# Altium footprint library ubloxLib.PcbLib: 41 footprints (part 2 of 3)
Each footprint in its own frame and in the unit in brackets; x right, y up, seen from the top. Pads: shape width x height; smd on the part's side, far side on the other; paste and mask are expansions set on the pad; w line width, h text height; cw(c..) or ccw(c..) is an arc to the next point about the centre after c.
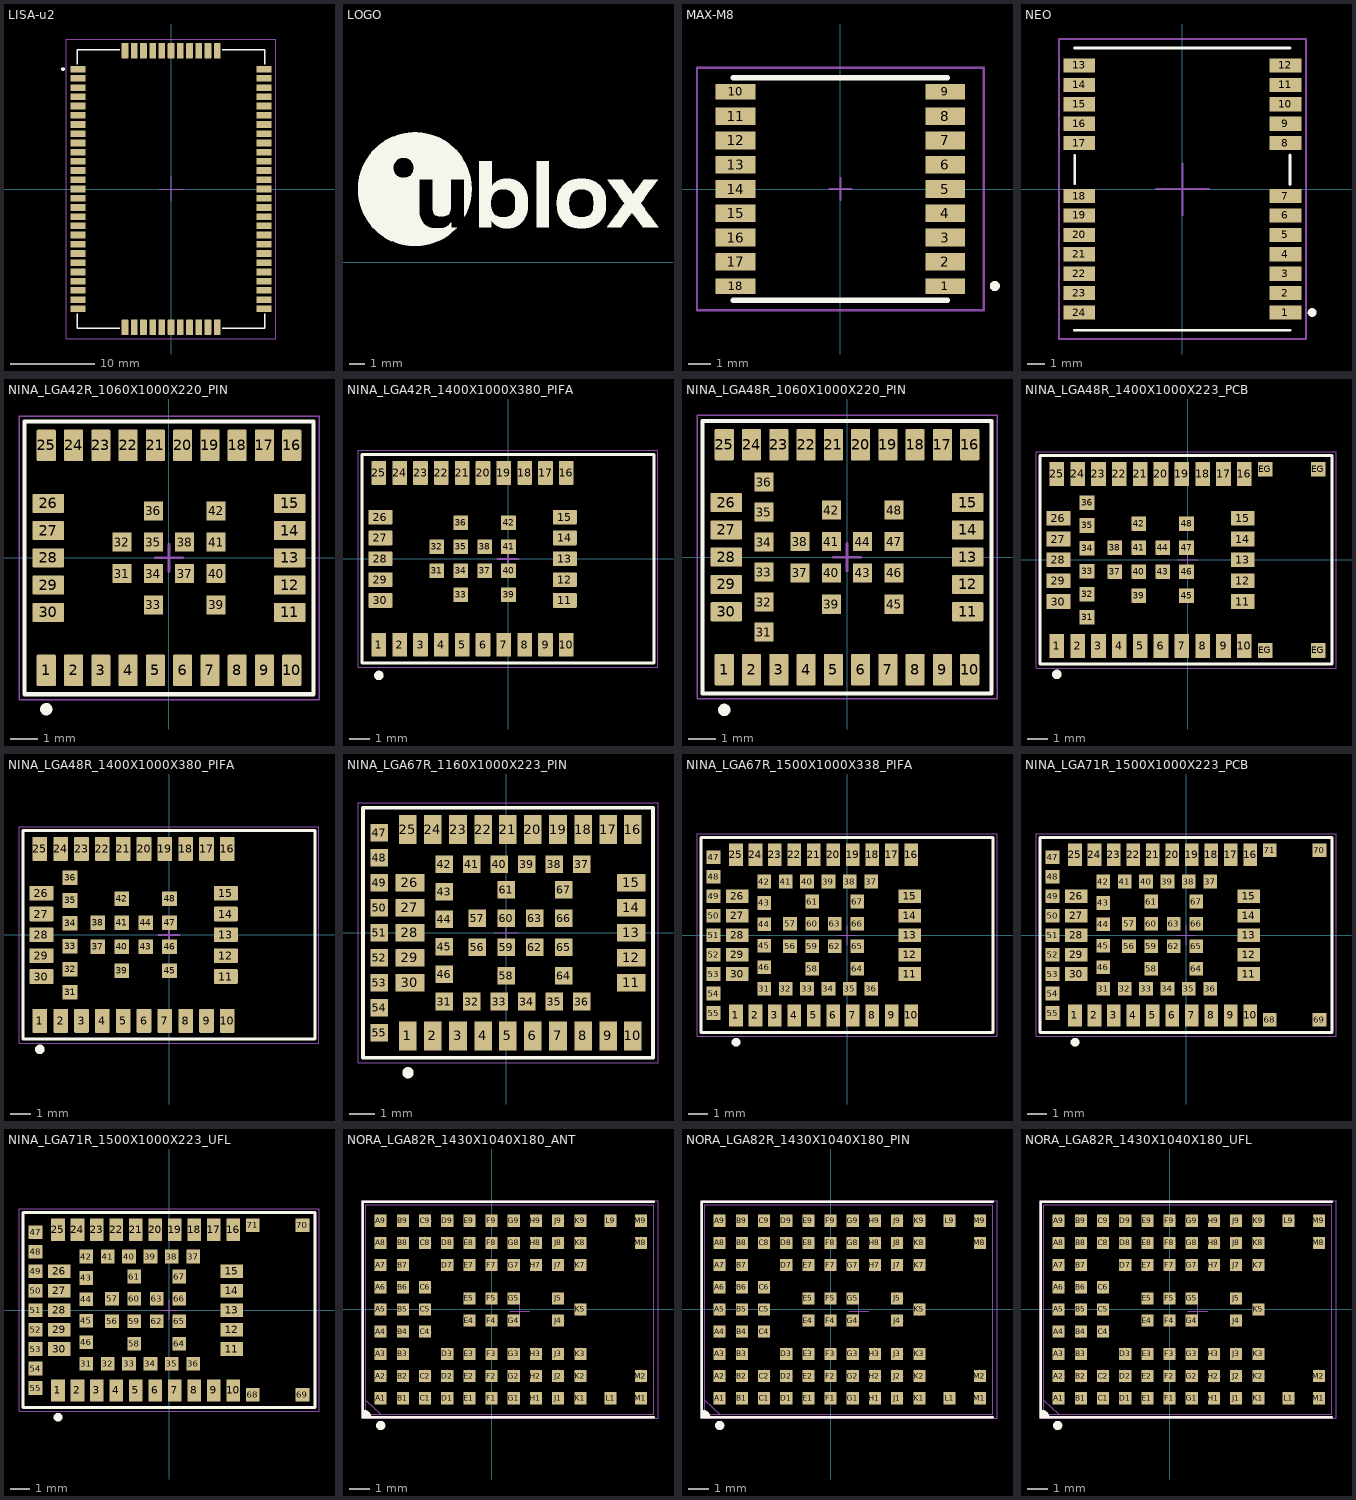
[diagram p1: the footprints below, top view; thin cyan lines are the x and y axes]

## LISA-u2 [mm] "3.75G HSPA+ Cellular Module"
height 2.87
pads (76):
  rrect7% 1.8x0.8 smd paste-10: 1(-11.1,14.3) 2(-11.1,13.2) 3(-11.1,12.1) 4(-11.1,11) 5(-11.1,9.9) 6(-11.1,8.8) 7(-11.1,7.7) 8(-11.1,6.6) 9(-11.1,5.5) 10(-11.1,4.4) 11(-11.1,3.3) 12(-11.1,2.2) 13(-11.1,1.1) 14(-11.1,0) 15(-11.1,-1.1) 16(-11.1,-2.2) 17(-11.1,-3.3) 18(-11.1,-4.4) 19(-11.1,-5.5) 20(-11.1,-6.6) 21(-11.1,-7.7) 22(-11.1,-8.8) 23(-11.1,-9.9) 24(-11.1,-11) 25(-11.1,-12.1) 26(-11.1,-13.2) 27(-11.1,-14.3) 39(11.1,-14.3) 40(11.1,-13.2) 41(11.1,-12.1) 42(11.1,-11) 43(11.1,-9.9) 44(11.1,-8.8) 45(11.1,-7.7) 46(11.1,-6.6) 47(11.1,-5.5) 48(11.1,-4.4) 49(11.1,-3.3) 50(11.1,-2.2) 51(11.1,-1.1) 52(11.1,0) 53(11.1,1.1) 54(11.1,2.2) 55(11.1,3.3) 56(11.1,4.4) 57(11.1,5.5) 58(11.1,6.6) 59(11.1,7.7) 60(11.1,8.8) 61(11.1,9.9) 62(11.1,11) 63(11.1,12.1) 64(11.1,13.2) 65(11.1,14.3)
  rrect7% 0.8x1.8 smd paste-10: 28(-5.5,-16.5) 29(-4.4,-16.5) 30(-3.3,-16.5) 31(-2.2,-16.5) 32(-1.1,-16.5) 33(0,-16.5) 34(1.1,-16.5) 35(2.2,-16.5) 36(3.3,-16.5) 37(4.4,-16.5) 38(5.5,-16.5) 66(5.5,16.5) 67(4.4,16.5) 68(3.3,16.5) 69(2.2,16.5) 70(1.1,16.5) 71(0,16.5) 72(-1.1,16.5) 73(-2.2,16.5) 74(-3.3,16.5) 75(-4.4,16.5) 76(-5.5,16.5)
Top Overlay:
  circle w0.254: c-12.9,14.3 r0.1
  lines w0.15: -11.2,-14.9 -11.2,-16.6 -6.1,-16.6 ; -11.2,14.9 -11.2,16.6 -6.1,16.6 ; 6.1,-16.6 11.2,-16.6 11.2,-14.9 ; 6.1,16.6 11.2,16.6 11.2,14.9
Top Paste:
  drawing of 152 lines, arcs and shapes, not listed
Mechanical 15:
  lines w0.05: -12.5,-17.9 -12.5,17.9 12.5,17.9 12.5,-17.9 -12.5,-17.9
  lines w0.1: -1.499,0 0,0 1.501,0 ; 0,-1.419 0,0.1 0,1.545
  text ".Designator" at 0.1,0.433 h1
3D body: height 2.87, standoff 0, extent -11.2,-16.6 11.2,16.6

## LOGO [mm] "u-blox logo"
Top Overlay:
  drawing of 5 lines, arcs and shapes, not listed

## MAX-M8 [mm] "u-blox M8 concurrent GNSS modules"
height 2.7
pads (18):
  rect 1.8x0.7 smd paste-10: 1(4.75,-4.4) 9(4.75,4.4) 10(-4.75,4.4) 18(-4.75,-4.4)
  rect 1.8x0.8 smd paste-10: 2(4.75,-3.3) 3(4.75,-2.2) 4(4.75,-1.1) 5(4.75,0) 6(4.75,1.1) 7(4.75,2.2) 8(4.75,3.3) 11(-4.75,3.3) 12(-4.75,2.2) 13(-4.75,1.1) 14(-4.75,0) 15(-4.75,-1.1) 16(-4.75,-2.2) 17(-4.75,-3.3)
Top Overlay:
  circle w0.254: c7,-4.4 r0.1
  lines w0.254: -4.85,-5.05 4.85,-5.05 ; -4.85,5.05 4.85,5.05
Top Paste:
  region: 6.25,2.9 6.25,3.7 4.85,3.7 4.85,3.6 3.95,3.6 3.95,3 4.85,3 4.85,2.9
  region: 6.25,1.8 6.25,2.6 4.85,2.6 4.85,2.5 3.95,2.5 3.95,1.9 4.85,1.9 4.85,1.8
  region: 6.25,0.7 6.25,1.5 4.85,1.5 4.85,1.4 3.95,1.4 3.95,0.8 4.85,0.8 4.85,0.7
  region: 6.25,-0.4 6.25,0.4 4.85,0.4 4.85,0.3 3.95,0.3 3.95,-0.3 4.85,-0.3 4.85,-0.4
  region: 6.25,-1.5 6.25,-0.7 4.85,-0.7 4.85,-0.8 3.95,-0.8 3.95,-1.4 4.85,-1.4 4.85,-1.5
  region: 6.25,-2.6 6.25,-1.8 4.85,-1.8 4.85,-1.9 3.95,-1.9 3.95,-2.5 4.85,-2.5 4.85,-2.6
  region: 6.25,-3.7 6.25,-2.9 4.85,-2.9 4.85,-3 3.95,-3 3.95,-3.6 4.85,-3.6 4.85,-3.7
  region: -6.25,-2.9 -6.25,-3.7 -4.85,-3.7 -4.85,-3.6 -3.95,-3.6 -3.95,-3 -4.85,-3 -4.85,-2.9
  region: -6.25,-1.8 -6.25,-2.6 -4.85,-2.6 -4.85,-2.5 -3.95,-2.5 -3.95,-1.9 -4.85,-1.9 -4.85,-1.8
  region: -6.25,-0.7 -6.25,-1.5 -4.85,-1.5 -4.85,-1.4 -3.95,-1.4 -3.95,-0.8 -4.85,-0.8 -4.85,-0.7
  region: -6.25,0.4 -6.25,-0.4 -4.85,-0.4 -4.85,-0.3 -3.95,-0.3 -3.95,0.3 -4.85,0.3 -4.85,0.4
  region: -6.25,1.5 -6.25,0.7 -4.85,0.7 -4.85,0.8 -3.95,0.8 -3.95,1.4 -4.85,1.4 -4.85,1.5
  region: -6.25,2.6 -6.25,1.8 -4.85,1.8 -4.85,1.9 -3.95,1.9 -3.95,2.5 -4.85,2.5 -4.85,2.6
  region: -6.25,3.7 -6.25,2.9 -4.85,2.9 -4.85,3 -3.95,3 -3.95,3.6 -4.85,3.6 -4.85,3.7
  region: -6.25,-4.05 -6.25,-4.75 -4.85,-4.75 -4.85,-4.65 -3.95,-4.65 -3.95,-4.15 -4.85,-4.15 -4.85,-4.05
  region: 6.25,-4.75 6.25,-4.05 4.85,-4.05 4.85,-4.15 3.95,-4.15 3.95,-4.65 4.85,-4.65 4.85,-4.75
  region: 6.25,4.05 6.25,4.75 4.85,4.75 4.85,4.65 3.95,4.65 3.95,4.15 4.85,4.15 4.85,4.05
  region: -6.25,4.75 -6.25,4.05 -4.85,4.05 -4.85,4.15 -3.95,4.15 -3.95,4.65 -4.85,4.65 -4.85,4.75
Mechanical 15:
  lines w0.1: -0.5,0 0,0 ; 0,-0.5 0,0 ; 0,0.5 0,0 ; 0.5,0 0,0 ; -6.5,-5.5 6.5,-5.5 6.5,5.5 -6.5,5.5 -6.5,-5.5
  text ".Designator" at 0.1,0.433 h1
3D body: height 2.7, standoff 0, extent -4.851,-5.05 4.849,5.05

## NEO [mm] "u-blox NEO GNSS module"
pads (24):
  rect 1.8x0.8 smd paste-0.1: 1(5.842,-7) 2(5.842,-5.9) 3(5.842,-4.8) 4(5.842,-3.7) 5(5.842,-2.6) 6(5.842,-1.5) 7(5.842,-0.4) 8(5.842,2.6) 9(5.842,3.7) 10(5.842,4.8) 11(5.842,5.9) 12(5.842,7) 13(-5.842,7) 14(-5.842,5.9) 15(-5.842,4.8) 16(-5.842,3.7) 17(-5.842,2.6) 18(-5.842,-0.4) 19(-5.842,-1.5) 20(-5.842,-2.6) 21(-5.842,-3.7) 22(-5.842,-4.8) 23(-5.842,-5.9) 24(-5.842,-7)
Top Overlay:
  circle w0.38: c7.35,-7 r0.058
  lines w0.16: -6.109,-8 6.096,-8 ; -6.109,7.996 6.09,7.996 ; -6.102,0.299 -6.102,1.893 ; 6.096,0.255 6.096,1.919
Top Paste:
  rectangle: -6.833,-4.1 -5.633,-3.3
  rectangle: -6.833,-7.4 -5.633,-6.6
  rectangle: -6.833,-6.3 -5.633,-5.5
  rectangle: -6.833,-5.2 -5.633,-4.4
  rectangle: -6.833,-3 -5.633,-2.2
  rectangle: -6.833,-1.9 -5.633,-1.1
  rectangle: -6.833,-0.8 -5.633,0
  rectangle: -6.833,2.2 -5.633,3
  rectangle: -6.833,3.3 -5.633,4.1
  rectangle: -6.833,4.4 -5.633,5.2
  rectangle: -6.833,5.5 -5.633,6.3
  rectangle: -6.833,6.6 -5.633,7.4
  rectangle: 5.642,6.6 6.842,7.4
  rectangle: 5.642,5.5 6.842,6.3
  rectangle: 5.642,4.4 6.842,5.2
  rectangle: 5.642,3.3 6.842,4.1
  rectangle: 5.642,2.2 6.842,3
  rectangle: 5.642,-0.8 6.842,0
  rectangle: 5.642,-1.9 6.842,-1.1
  rectangle: 5.642,-3 6.842,-2.2
  rectangle: 5.642,-4.1 6.842,-3.3
  rectangle: 5.642,-5.2 6.842,-4.4
  rectangle: 5.642,-6.3 6.842,-5.5
  rectangle: 5.642,-7.4 6.842,-6.6
Mechanical 15:
  lines w0.1: -1.499,0 0,0 ; 0,-1.519 0,0 ; 0,1.445 0,0 ; 1.501,0 0,0 ; -7,-8.5 -7,8.5 7,8.5 7,-8.5 -7,-8.5
  text ".Designator" at 0.1,0.433 h1
3D body "NEO (STEP-AP214)_B.STEP": height 2.28, standoff -0.05, extent -6.104,-8 6.096,8

## NINA_LGA42R_1060X1000X220_PIN [mm] "Stand-alone Bluetooth low energy module"
height 2.2
pads (42):
  rrect10% 0.7x1.15 smd paste+0 mask+0.05: 1(-4.5,-4.125) 2(-3.5,-4.125) 3(-2.5,-4.125) 4(-1.5,-4.125) 5(-0.5,-4.125) 6(0.5,-4.125) 7(1.5,-4.125) 8(2.5,-4.125) 9(3.5,-4.125) 10(4.5,-4.125) 16(4.5,4.125) 17(3.5,4.125) 18(2.5,4.125) 19(1.5,4.125) 20(0.5,4.125) 21(-0.5,4.125) 22(-1.5,4.125) 23(-2.5,4.125) 24(-3.5,4.125) 25(-4.5,4.125)
  rrect10% 1.15x0.7 smd paste+0 mask+0.05: 11(4.425,-2) 12(4.425,-1) 13(4.425,0) 14(4.425,1) 15(4.425,2) 26(-4.425,2) 27(-4.425,1) 28(-4.425,0) 29(-4.425,-1) 30(-4.425,-2)
  rect 0.7x0.7 smd paste+0 mask+0.05: 31(-1.725,-0.575) 32(-1.725,0.575) 33(-0.575,-1.725) 34(-0.575,-0.575) 35(-0.575,0.575) 36(-0.575,1.725) 37(0.575,-0.575) 38(0.575,0.575) 39(1.725,-1.725) 40(1.725,-0.575) 41(1.725,0.575) 42(1.725,1.725)
Top Overlay:
  circle w0.254: c-4.5,-5.55 r0.1
  lines w0.15: -5.3,-5 5.3,-5 5.3,5 -5.3,5 -5.3,-5
Mechanical 13:
  lines w0.1: -5.3,-5 5.302,-5 5.302,5 -5.3,5 -5.3,-5
Mechanical 15:
  lines w0.05: -5.5,-5.2 -5.5,5.2 5.5,5.2 5.5,-5.2 -5.5,-5.2
  lines w0.1: -0.5,0 0,0 0.5,0 ; 0,-0.5 0,0.5
  text ".Designator" at 0.1,0.433 h1
3D body "NINA-B111.STEP": height 2.26, standoff 0.03, extent -5.3,-5 5.3,5

## NINA_LGA42R_1400X1000X380_PIFA [mm] "Stand-alone Bluetooth low energy module"
height 3.8
pads (42):
  rrect10% 0.7x1.15 smd paste+0 mask+0.05: 1(-6.2,-4.125) 2(-5.2,-4.125) 3(-4.2,-4.125) 4(-3.2,-4.125) 5(-2.2,-4.125) 6(-1.2,-4.125) 7(-0.2,-4.125) 8(0.8,-4.125) 9(1.8,-4.125) 10(2.8,-4.125) 16(2.8,4.125) 17(1.8,4.125) 18(0.8,4.125) 19(-0.2,4.125) 20(-1.2,4.125) 21(-2.2,4.125) 22(-3.2,4.125) 23(-4.2,4.125) 24(-5.2,4.125) 25(-6.2,4.125)
  rrect10% 1.15x0.7 smd paste+0 mask+0.05: 11(2.725,-2) 12(2.725,-1) 13(2.725,0) 14(2.725,1) 15(2.725,2) 26(-6.125,2) 27(-6.125,1) 28(-6.125,0) 29(-6.125,-1) 30(-6.125,-2)
  rect 0.7x0.7 smd paste+0 mask+0.05: 31(-3.425,-0.575) 32(-3.425,0.575) 33(-2.275,-1.725) 34(-2.275,-0.575) 35(-2.275,0.575) 36(-2.275,1.725) 37(-1.125,-0.575) 38(-1.125,0.575) 39(0.025,-1.725) 40(0.025,-0.575) 41(0.025,0.575) 42(0.025,1.725)
Top Overlay:
  circle w0.254: c-6.2,-5.6 r0.1
  lines w0.15: -7,-5 -7,5 7,5 7,-5 -7,-5
Mechanical 13:
  lines w0.1: -7,-5 -7,5 7,5 7,-5 -7,-5
Mechanical 15:
  lines w0.05: -7.2,-5.2 -7.2,5.2 7.2,5.2 7.2,-5.2 -7.2,-5.2
  lines w0.1: -0.5,0 0,0 ; 0,-0.5 0,0.5 ; 0,0 0.5,0 0,0
  text ".Designator" at 0.1,0.433 h1
3D body "NINA-B112.stp": height 3.81, standoff 0.03, extent -7,-5 7,5

## NINA_LGA48R_1060X1000X220_PIN [mm] "Stand-alone Bluetooth low energy module"
height 2.2
pads (48):
  rrect10% 0.7x1.15 smd paste+0 mask+0.05: 1(-4.5,-4.125) 2(-3.5,-4.125) 3(-2.5,-4.125) 4(-1.5,-4.125) 5(-0.5,-4.125) 6(0.5,-4.125) 7(1.5,-4.125) 8(2.5,-4.125) 9(3.5,-4.125) 10(4.5,-4.125) 16(4.5,4.125) 17(3.5,4.125) 18(2.5,4.125) 19(1.5,4.125) 20(0.5,4.125) 21(-0.5,4.125) 22(-1.5,4.125) 23(-2.5,4.125) 24(-3.5,4.125) 25(-4.5,4.125)
  rrect10% 1.15x0.7 smd paste+0 mask+0.05: 11(4.425,-2) 12(4.425,-1) 13(4.425,0) 14(4.425,1) 15(4.425,2) 26(-4.425,2) 27(-4.425,1) 28(-4.425,0) 29(-4.425,-1) 30(-4.425,-2)
  rect 0.7x0.7 smd paste+0 mask+0.05: 31(-3.05,-2.75) 32(-3.05,-1.65) 33(-3.05,-0.55) 34(-3.05,0.55) 35(-3.05,1.65) 36(-3.05,2.75) 37(-1.725,-0.575) 38(-1.725,0.575) 39(-0.575,-1.725) 40(-0.575,-0.575) 41(-0.575,0.575) 42(-0.575,1.725) 43(0.575,-0.575) 44(0.575,0.575) 45(1.725,-1.725) 46(1.725,-0.575) 47(1.725,0.575) 48(1.725,1.725)
Top Overlay:
  circle w0.254: c-4.5,-5.6 r0.1
  lines w0.15: -5.3,-5 -5.3,5 5.3,5 5.3,-5 -5.3,-5
Mechanical 13:
  lines w0.1: -5.3,-5 -5.3,5 5.302,5 5.302,-5 -5.3,-5
Mechanical 15:
  lines w0.05: -5.5,-5.2 5.5,-5.2 5.5,5.2 -5.5,5.2 -5.5,-5.2
  lines w0.1: -0.5,0 0,0 0.5,0 ; 0,-0.5 0,0.5
  text ".Designator" at 0.1,0.433 h1
3D body "NINA-W131-00B.STEP": height 2.25, standoff 0.04, extent -5.3,-5 5.3,5

## NINA_LGA48R_1400X1000X223_PCB [mm] "Stand-alone Bluetooth low energy module"
height 2.23
pads (52):
  rect 0.7x1.15 smd paste+0 mask+0.05: 1(-6.275,-4.125) 2(-5.275,-4.125) 3(-4.275,-4.125) 4(-3.275,-4.125) 5(-2.275,-4.125) 6(-1.275,-4.125) 7(-0.275,-4.125) 8(0.725,-4.125) 9(1.725,-4.125) 10(2.725,-4.125) 16(2.725,4.125) 17(1.725,4.125) 18(0.725,4.125) 19(-0.275,4.125) 20(-1.275,4.125) 21(-2.275,4.125) 22(-3.275,4.125) 23(-4.275,4.125) 24(-5.275,4.125) 25(-6.275,4.125)
  rect 1.15x0.7 smd paste+0 mask+0.05: 11(2.65,-2) 12(2.65,-1) 13(2.65,0) 14(2.65,1) 15(2.65,2) 26(-6.2,2) 27(-6.2,1) 28(-6.2,0) 29(-6.2,-1) 30(-6.2,-2)
  rect 0.7x0.7 smd paste+0 mask+0.05: 31(-4.825,-2.75) 32(-4.825,-1.65) 33(-4.825,-0.55) 34(-4.825,0.55) 35(-4.825,1.65) 36(-4.825,2.75) 37(-3.5,-0.575) 38(-3.5,0.575) 39(-2.35,-1.725) 40(-2.35,-0.575) 41(-2.35,0.575) 42(-2.35,1.725) 43(-1.2,-0.575) 44(-1.2,0.575) 45(-0.05,-1.725) 46(-0.05,-0.575) 47(-0.05,0.575) 48(-0.05,1.725) EG(3.725,-4.35) EG(3.725,4.35) EG(6.275,-4.35) EG(6.275,4.35)
Top Overlay:
  circle w0.254: c-6.275,-5.5 r0.1
  lines w0.15: -7.075,-5 6.925,-5 6.925,5 -7.075,5 -7.075,-5
Mechanical 13:
  lines w0.1: -7.075,-5 6.925,-5 6.925,5 -7.075,5 -7.075,-5
Mechanical 15:
  lines w0.05: -0.5,0 0.5,0 ; 0,-0.5 0,0.5 ; -7.275,-5.2 7.125,-5.2 7.125,5.2 -7.275,5.2 -7.275,-5.2
  text ".Designator" at 0.1,0.433 h1
Multi-Layer:
  pour cut-out: 3.825,4 6.925,4 6.925,-4 3.825,-4
3D body "NINA-W1x6.STEP": height 2.25, standoff -0.01, extent -7.075,-5 6.925,5

## NINA_LGA48R_1400X1000X380_PIFA [mm] "Stand-alone Bluetooth low energy module"
height 3.8
pads (48):
  rrect10% 0.7x1.15 smd paste+0 mask+0.05: 1(-6.2,-4.125) 2(-5.2,-4.125) 3(-4.2,-4.125) 4(-3.2,-4.125) 5(-2.2,-4.125) 6(-1.2,-4.125) 7(-0.2,-4.125) 8(0.8,-4.125) 9(1.8,-4.125) 10(2.8,-4.125) 16(2.8,4.125) 17(1.8,4.125) 18(0.8,4.125) 19(-0.2,4.125) 20(-1.2,4.125) 21(-2.2,4.125) 22(-3.2,4.125) 23(-4.2,4.125) 24(-5.2,4.125) 25(-6.2,4.125)
  rrect10% 1.15x0.7 smd paste+0 mask+0.05: 11(2.725,-2) 12(2.725,-1) 13(2.725,0) 14(2.725,1) 15(2.725,2) 26(-6.125,2) 27(-6.125,1) 28(-6.125,0) 29(-6.125,-1) 30(-6.125,-2)
  rect 0.7x0.7 smd paste+0 mask+0.05: 31(-4.75,-2.75) 32(-4.75,-1.65) 33(-4.75,-0.55) 34(-4.75,0.55) 35(-4.75,1.65) 36(-4.75,2.75) 37(-3.425,-0.575) 38(-3.425,0.575) 39(-2.275,-1.725) 40(-2.275,-0.575) 41(-2.275,0.575) 42(-2.275,1.725) 43(-1.125,-0.575) 44(-1.125,0.575) 45(0.025,-1.725) 46(0.025,-0.575) 47(0.025,0.575) 48(0.025,1.725)
Top Overlay:
  circle w0.254: c-6.2,-5.5 r0.1
  lines w0.15: -7,-5 7,-5 7,5 -7,5 -7,-5
Mechanical 13:
  lines w0.1: -7,-5 7,-5 7,5 -7,5 -7,-5
Mechanical 15:
  lines w0.05: -7.2,-5.2 7.2,-5.2 7.2,5.2 -7.2,5.2 -7.2,-5.2
  lines w0.1: -0.5,0 0,0 0.5,0 ; 0,-0.5 0,0.5
  text ".Designator" at 0.1,0.433 h1
3D body "NINA-W132-00B.STEP": height 3.86, standoff 0.04, extent -7,-5 7,5

## NINA_LGA67R_1160X1000X223_PIN [mm] "Stand-alone Bluetooth low energy module"
height 2.23
pads (67):
  rect 0.7x1.15 smd paste+0 mask+0.05: 1(-3.925,-4.125) 2(-2.925,-4.125) 3(-1.925,-4.125) 4(-0.925,-4.125) 5(0.075,-4.125) 6(1.075,-4.125) 7(2.075,-4.125) 8(3.075,-4.125) 9(4.075,-4.125) 10(5.075,-4.125) 16(5.075,4.125) 17(4.075,4.125) 18(3.075,4.125) 19(2.075,4.125) 20(1.075,4.125) 21(0.075,4.125) 22(-0.925,4.125) 23(-1.925,4.125) 24(-2.925,4.125) 25(-3.925,4.125)
  rect 1.15x0.7 smd paste+0 mask+0.05: 11(5,-2) 12(5,-1) 13(5,0) 14(5,1) 15(5,2) 26(-3.85,2) 27(-3.85,1) 28(-3.85,0) 29(-3.85,-1) 30(-3.85,-2)
  rect 0.7x0.7 smd paste+0 mask+0.05: 31(-2.475,-2.75) 32(-1.375,-2.75) 33(-0.275,-2.75) 34(0.825,-2.75) 35(1.925,-2.75) 36(3.025,-2.75) 37(3.025,2.75) 38(1.925,2.75) 39(0.825,2.75) 40(-0.275,2.75) 41(-1.375,2.75) 42(-2.475,2.75) 43(-2.475,1.65) 44(-2.475,0.55) 45(-2.475,-0.55) 46(-2.475,-1.65) 47(-5.075,4) 48(-5.075,3) 49(-5.075,2) 50(-5.075,1) 51(-5.075,0) 52(-5.075,-1) 53(-5.075,-2) 54(-5.075,-3) 55(-5.075,-4) 56(-1.15,-0.575) 57(-1.15,0.575) 58(0,-1.725) 59(0,-0.575) 60(0,0.575) 61(0,1.725) 62(1.15,-0.575) 63(1.15,0.575) 64(2.3,-1.725) 65(2.3,-0.575) 66(2.3,0.575) 67(2.3,1.725)
Top Overlay:
  circle w0.254: c-3.925,-5.6 r0.1
  lines w0.15: -5.725,-5 -5.725,5 5.875,5 5.875,-5 -5.725,-5
Mechanical 13:
  lines w0.1: -5.725,-5 5.875,-5 5.875,5 -5.725,5 -5.725,-5
Mechanical 15:
  lines w0.05: -0.5,0 0.5,0 ; 0,-0.5 0,0.5 ; -5.925,-5.2 6.075,-5.2 6.075,5.2 -5.925,5.2 -5.925,-5.2
  text ".Designator" at 0.1,0.433 h1
3D body "NINA-B311_mechanical_model.stp": height 2.36, standoff 0.03, extent -5.725,-5 5.875,5

## NINA_LGA67R_1500X1000X338_PIFA [mm] "Stand-alone Bluetooth low energy module"
height 3.38
pads (67):
  rect 0.7x1.15 smd paste+0 mask+0.05: 1(-5.7,-4.125) 2(-4.7,-4.125) 3(-3.7,-4.125) 4(-2.7,-4.125) 5(-1.7,-4.125) 6(-0.7,-4.125) 7(0.3,-4.125) 8(1.3,-4.125) 9(2.3,-4.125) 10(3.3,-4.125) 16(3.3,4.125) 17(2.3,4.125) 18(1.3,4.125) 19(0.3,4.125) 20(-0.7,4.125) 21(-1.7,4.125) 22(-2.7,4.125) 23(-3.7,4.125) 24(-4.7,4.125) 25(-5.7,4.125)
  rect 1.15x0.7 smd paste+0 mask+0.05: 11(3.225,-2) 12(3.225,-1) 13(3.225,0) 14(3.225,1) 15(3.225,2) 26(-5.625,2) 27(-5.625,1) 28(-5.625,0) 29(-5.625,-1) 30(-5.625,-2)
  rect 0.7x0.7 smd paste+0 mask+0.05: 31(-4.25,-2.75) 32(-3.15,-2.75) 33(-2.05,-2.75) 34(-0.95,-2.75) 35(0.15,-2.75) 36(1.25,-2.75) 37(1.25,2.75) 38(0.15,2.75) 39(-0.95,2.75) 40(-2.05,2.75) 41(-3.15,2.75) 42(-4.25,2.75) 43(-4.25,1.65) 44(-4.25,0.55) 45(-4.25,-0.55) 46(-4.25,-1.65) 47(-6.85,4) 48(-6.85,3) 49(-6.85,2) 50(-6.85,1) 51(-6.85,0) 52(-6.85,-1) 53(-6.85,-2) 54(-6.85,-3) 55(-6.85,-4) 56(-2.925,-0.575) 57(-2.925,0.575) 58(-1.775,-1.725) 59(-1.775,-0.575) 60(-1.775,0.575) 61(-1.775,1.725) 62(-0.625,-0.575) 63(-0.625,0.575) 64(0.525,-1.725) 65(0.525,-0.575) 66(0.525,0.575) 67(0.525,1.725)
Top Overlay:
  circle w0.254: c-5.7,-5.5 r0.1
  lines w0.15: -7.5,-5 -7.5,5 7.5,5 7.5,-5 -7.5,-5
Mechanical 13:
  lines w0.1: -7.5,-5 -7.5,5 7.5,5 7.5,-5 -7.5,-5
Mechanical 15:
  lines w0.05: -0.5,0 0.5,0 ; 0,-0.5 0,0.5 ; -7.7,-5.2 -7.7,5.2 7.7,5.2 7.7,-5.2 -7.7,-5.2
  text ".Designator" at 0.1,0.433 h1
3D body "NINA-B312_mechanical_model.stp": height 3.91, standoff 0.03, extent -7.5,-5 7.5,5

## NINA_LGA71R_1500X1000X223_PCB [mm] "Stand-alone Bluetooth low energy module"
height 3.38
pads (71):
  rect 0.7x1.15 smd paste+0 mask+0.05: 1(-5.7,-4.125) 2(-4.7,-4.125) 3(-3.7,-4.125) 4(-2.7,-4.125) 5(-1.7,-4.125) 6(-0.7,-4.125) 7(0.3,-4.125) 8(1.3,-4.125) 9(2.3,-4.125) 10(3.3,-4.125) 16(3.3,4.125) 17(2.3,4.125) 18(1.3,4.125) 19(0.3,4.125) 20(-0.7,4.125) 21(-1.7,4.125) 22(-2.7,4.125) 23(-3.7,4.125) 24(-4.7,4.125) 25(-5.7,4.125)
  rect 1.15x0.7 smd paste+0 mask+0.05: 11(3.225,-2) 12(3.225,-1) 13(3.225,0) 14(3.225,1) 15(3.225,2) 26(-5.625,2) 27(-5.625,1) 28(-5.625,0) 29(-5.625,-1) 30(-5.625,-2)
  rect 0.7x0.7 smd paste+0 mask+0.05: 31(-4.25,-2.75) 32(-3.15,-2.75) 33(-2.05,-2.75) 34(-0.95,-2.75) 35(0.15,-2.75) 36(1.25,-2.75) 37(1.25,2.75) 38(0.15,2.75) 39(-0.95,2.75) 40(-2.05,2.75) 41(-3.15,2.75) 42(-4.25,2.75) 43(-4.25,1.65) 44(-4.25,0.55) 45(-4.25,-0.55) 46(-4.25,-1.65) 47(-6.85,4) 48(-6.85,3) 49(-6.85,2) 50(-6.85,1) 51(-6.85,0) 52(-6.85,-1) 53(-6.85,-2) 54(-6.85,-3) 55(-6.85,-4) 56(-2.925,-0.575) 57(-2.925,0.575) 58(-1.775,-1.725) 59(-1.775,-0.575) 60(-1.775,0.575) 61(-1.775,1.725) 62(-0.625,-0.575) 63(-0.625,0.575) 64(0.525,-1.725) 65(0.525,-0.575) 66(0.525,0.575) 67(0.525,1.725) 68(4.3,-4.35) 69(6.85,-4.35) 70(6.85,4.35) 71(4.3,4.35)
Top Overlay:
  circle w0.254: c-5.7,-5.5 r0.1
  lines w0.15: -7.5,-5 -7.5,5 7.5,5 7.5,-5 -7.5,-5
Mechanical 13:
  lines w0.1: -7.5,-5 -7.5,5 7.5,5 7.5,-5 -7.5,-5
Mechanical 15:
  lines w0.05: -0.5,0 0.5,0 ; 0,-0.5 0,0.5 ; -7.7,-5.2 -7.7,5.2 7.7,5.2 7.7,-5.2 -7.7,-5.2
  text ".Designator" at 0.1,0.433 h1
Multi-Layer:
  pour cut-out: 4.4,4 7.5,4 7.5,-4 4.4,-4
3D body "NINA-B3x6_mechanical_model.stp": height 2.31, standoff 0.03, extent -7.5,-5 7.5,5

## NINA_LGA71R_1500X1000X223_UFL [mm] "Stand-alone Bluetooth low energy module"
height 2.23
pads (71):
  rect 0.7x1.15 smd paste+0 mask+0.05: 1(-5.7,-4.125) 2(-4.7,-4.125) 3(-3.7,-4.125) 4(-2.7,-4.125) 5(-1.7,-4.125) 6(-0.7,-4.125) 7(0.3,-4.125) 8(1.3,-4.125) 9(2.3,-4.125) 10(3.3,-4.125) 16(3.3,4.125) 17(2.3,4.125) 18(1.3,4.125) 19(0.3,4.125) 20(-0.7,4.125) 21(-1.7,4.125) 22(-2.7,4.125) 23(-3.7,4.125) 24(-4.7,4.125) 25(-5.7,4.125)
  rect 1.15x0.7 smd paste+0 mask+0.05: 11(3.225,-2) 12(3.225,-1) 13(3.225,0) 14(3.225,1) 15(3.225,2) 26(-5.625,2) 27(-5.625,1) 28(-5.625,0) 29(-5.625,-1) 30(-5.625,-2)
  rect 0.7x0.7 smd paste+0 mask+0.05: 31(-4.25,-2.75) 32(-3.15,-2.75) 33(-2.05,-2.75) 34(-0.95,-2.75) 35(0.15,-2.75) 36(1.25,-2.75) 37(1.25,2.75) 38(0.15,2.75) 39(-0.95,2.75) 40(-2.05,2.75) 41(-3.15,2.75) 42(-4.25,2.75) 43(-4.25,1.65) 44(-4.25,0.55) 45(-4.25,-0.55) 46(-4.25,-1.65) 47(-6.85,4) 48(-6.85,3) 49(-6.85,2) 50(-6.85,1) 51(-6.85,0) 52(-6.85,-1) 53(-6.85,-2) 54(-6.85,-3) 55(-6.85,-4) 56(-2.925,-0.575) 57(-2.925,0.575) 58(-1.775,-1.725) 59(-1.775,-0.575) 60(-1.775,0.575) 61(-1.775,1.725) 62(-0.625,-0.575) 63(-0.625,0.575) 64(0.525,-1.725) 65(0.525,-0.575) 66(0.525,0.575) 67(0.525,1.725) 68(4.3,-4.35) 69(6.85,-4.35) 70(6.85,4.35) 71(4.3,4.35)
Top Overlay:
  circle w0.254: c-5.7,-5.5 r0.1
  lines w0.15: -7.5,-5 7.5,-5 7.5,5 -7.5,5 -7.5,-5
Mechanical 13:
  lines w0.1: -7.5,-5 7.5,-5 7.5,5 -7.5,5 -7.5,-5
Mechanical 15:
  lines w0.05: -0.5,0 0.5,0 ; 0,-0.5 0,0.5 ; -7.7,-5.2 7.7,-5.2 7.7,5.2 -7.7,5.2 -7.7,-5.2
  text ".Designator" at 0.1,0.433 h1
3D body "NINA-B400.stp": height 2.31, standoff 0.03, extent -7.5,-5 7.5,5

## NORA_LGA82R_1430X1040X180_ANT [mm] "NORA LGA, 82pin ,1.1mm Pitch, 14.3mm x 10.4mm"
height 1.8
pads (82):
  rect 0.6x0.6 smd: A1(-5.5,-4.4) A2(-5.5,-3.3) A3(-5.5,-2.2) A4(-5.5,-1.1) A5(-5.5,0) A6(-5.5,1.1) A7(-5.5,2.2) A8(-5.5,3.3) A9(-5.5,4.4) B1(-4.4,-4.4) B2(-4.4,-3.3) B3(-4.4,-2.2) B4(-4.4,-1.1) B5(-4.4,0) B6(-4.4,1.1) B7(-4.4,2.2) B8(-4.4,3.3) B9(-4.4,4.4) C1(-3.3,-4.4) C2(-3.3,-3.3) C4(-3.3,-1.1) C5(-3.3,0) C6(-3.3,1.1) C8(-3.3,3.3) C9(-3.3,4.4) D1(-2.2,-4.4) D2(-2.2,-3.3) D3(-2.2,-2.2) D7(-2.2,2.2) D8(-2.2,3.3) D9(-2.2,4.4) E1(-1.1,-4.4) E2(-1.1,-3.3) E3(-1.1,-2.2) E4(-1.1,-0.55) E5(-1.1,0.55) E7(-1.1,2.2) E8(-1.1,3.3) E9(-1.1,4.4) F1(0,-4.4) F2(0,-3.3) F3(0,-2.2) F4(0,-0.55) F5(0,0.55) F7(0,2.2) F8(0,3.3) F9(0,4.4) G1(1.1,-4.4) G2(1.1,-3.3) G3(1.1,-2.2) G4(1.1,-0.55) G5(1.1,0.55) G7(1.1,2.2) G8(1.1,3.3) G9(1.1,4.4) H1(2.2,-4.4) H2(2.2,-3.3) H3(2.2,-2.2) H7(2.2,2.2) H8(2.2,3.3) H9(2.2,4.4) J1(3.3,-4.4) J2(3.3,-3.3) J3(3.3,-2.2) J4(3.3,-0.55) J5(3.3,0.55) J7(3.3,2.2) J8(3.3,3.3) J9(3.3,4.4) K1(4.4,-4.4) K2(4.4,-3.3) K3(4.4,-2.2) K5(4.4,0) K7(4.4,2.2) K8(4.4,3.3) K9(4.4,4.4) L1(5.9,-4.4) L9(5.9,4.4) M1(7.4,-4.4) M2(7.4,-3.3) M8(7.4,3.3) M9(7.4,4.4)
Top Overlay:
  circle w0.254: c-5.5,-5.75 r0.1
  lines w0.127: 8.05,-5.35 -6.4,-5.35 -6.4,5.35 8.05,5.35
  lines w0.128: -6.343,-5.194 -6.193,-5.344 ; -6.3,-5.15 cw(c-6.3,-5.3) -6.15,-5.3 ; -6.3,-5.05 cw(c-6.325,-5.349) -6.025,-5.349
Mechanical 11:
  text ".Designator" at -1.075,-0.775 h1.5
Mechanical 13:
  lines w0.05: -6.25,-4.5 -5.5,-5.2 ; -6.25,-5.2 8.05,-5.2 8.05,5.2 -6.25,5.2 -6.25,-5.2
Mechanical 14:
  drawing of 328 lines, arcs and shapes, not listed
Mechanical 15:
  lines w0.05: 0.9,-0.1 1.9,-0.1 ; 1.4,-0.6 1.4,0.4 ; -6.45,-5.4 -6.45,5.4 8.25,5.4 8.25,-5.4 -6.45,-5.4
Mechanical 16:
  drawing of 492 lines, arcs and shapes, not listed
Multi-Layer:
  pour cut-out: 7.1,-4.1 7.1,-3.001 7.9,-2.998 7.9,-5.225 8.25,-5.225 8.25,5.325 7.9,5.325 7.9,3 7.1,3 7.1,4.1 4.7,4.1 4.7,-4.1
3D body "NORA-B506_v1.step": height 1.78, standoff -0.01, extent -6.25,-5.2 8.05,5.2

## NORA_LGA82R_1430X1040X180_PIN [mm] "NORA LGA, 82pin ,1.1mm Pitch, 14.3mm x 10.4mm"
height 1.8
pads (82):
  rect 0.6x0.6 smd: A1(-5.5,-4.4) A2(-5.5,-3.3) A3(-5.5,-2.2) A4(-5.5,-1.1) A5(-5.5,0) A6(-5.5,1.1) A7(-5.5,2.2) A8(-5.5,3.3) A9(-5.5,4.4) B1(-4.4,-4.4) B2(-4.4,-3.3) B3(-4.4,-2.2) B4(-4.4,-1.1) B5(-4.4,0) B6(-4.4,1.1) B7(-4.4,2.2) B8(-4.4,3.3) B9(-4.4,4.4) C1(-3.3,-4.4) C2(-3.3,-3.3) C4(-3.3,-1.1) C5(-3.3,0) C6(-3.3,1.1) C8(-3.3,3.3) C9(-3.3,4.4) D1(-2.2,-4.4) D2(-2.2,-3.3) D3(-2.2,-2.2) D7(-2.2,2.2) D8(-2.2,3.3) D9(-2.2,4.4) E1(-1.1,-4.4) E2(-1.1,-3.3) E3(-1.1,-2.2) E4(-1.1,-0.55) E5(-1.1,0.55) E7(-1.1,2.2) E8(-1.1,3.3) E9(-1.1,4.4) F1(0,-4.4) F2(0,-3.3) F3(0,-2.2) F4(0,-0.55) F5(0,0.55) F7(0,2.2) F8(0,3.3) F9(0,4.4) G1(1.1,-4.4) G2(1.1,-3.3) G3(1.1,-2.2) G4(1.1,-0.55) G5(1.1,0.55) G7(1.1,2.2) G8(1.1,3.3) G9(1.1,4.4) H1(2.2,-4.4) H2(2.2,-3.3) H3(2.2,-2.2) H7(2.2,2.2) H8(2.2,3.3) H9(2.2,4.4) J1(3.3,-4.4) J2(3.3,-3.3) J3(3.3,-2.2) J4(3.3,-0.55) J5(3.3,0.55) J7(3.3,2.2) J8(3.3,3.3) J9(3.3,4.4) K1(4.4,-4.4) K2(4.4,-3.3) K3(4.4,-2.2) K5(4.4,0) K7(4.4,2.2) K8(4.4,3.3) K9(4.4,4.4) L1(5.9,-4.4) L9(5.9,4.4) M1(7.4,-4.4) M2(7.4,-3.3) M8(7.4,3.3) M9(7.4,4.4)
Top Overlay:
  circle w0.254: c-5.5,-5.75 r0.1
  lines w0.127: 8.05,-5.35 -6.4,-5.35 -6.4,5.35 8.05,5.35
  lines w0.128: -6.343,-5.194 -6.193,-5.344 ; -6.3,-5.15 cw(c-6.3,-5.3) -6.15,-5.3 ; -6.3,-5.05 cw(c-6.325,-5.349) -6.025,-5.349
Mechanical 11:
  text ".Designator" at -1.075,-0.775 h1.5
Mechanical 13:
  lines w0.05: -6.25,-4.5 -5.5,-5.2 ; -6.25,-5.2 8.05,-5.2 8.05,5.2 -6.25,5.2 -6.25,-5.2
Mechanical 14:
  drawing of 328 lines, arcs and shapes, not listed
Mechanical 15:
  lines w0.05: 0.9,-0.1 1.9,-0.1 ; 1.4,-0.6 1.4,0.4 ; -6.45,-5.4 -6.45,5.4 8.25,5.4 8.25,-5.4 -6.45,-5.4
Mechanical 16:
  drawing of 492 lines, arcs and shapes, not listed
Multi-Layer:
  pour cut-out: 7.1,-4.1 7.1,-3.001 7.9,-2.998 7.9,-5.225 8.25,-5.225 8.25,5.325 7.9,5.325 7.9,3 7.1,3 7.1,4.1 4.7,4.1 4.7,-4.1
3D body "NORA-B101_revA.step": height 1.78, standoff -0.01, extent -6.25,-5.2 8.05,5.2

## NORA_LGA82R_1430X1040X180_UFL [mm] "NORA LGA, 82pin ,1.1mm Pitch, 14.3mm x 10.4mm"
height 1.8
pads (82):
  rect 0.6x0.6 smd: A1(-5.5,-4.4) A2(-5.5,-3.3) A3(-5.5,-2.2) A4(-5.5,-1.1) A5(-5.5,0) A6(-5.5,1.1) A7(-5.5,2.2) A8(-5.5,3.3) A9(-5.5,4.4) B1(-4.4,-4.4) B2(-4.4,-3.3) B3(-4.4,-2.2) B4(-4.4,-1.1) B5(-4.4,0) B6(-4.4,1.1) B7(-4.4,2.2) B8(-4.4,3.3) B9(-4.4,4.4) C1(-3.3,-4.4) C2(-3.3,-3.3) C4(-3.3,-1.1) C5(-3.3,0) C6(-3.3,1.1) C8(-3.3,3.3) C9(-3.3,4.4) D1(-2.2,-4.4) D2(-2.2,-3.3) D3(-2.2,-2.2) D7(-2.2,2.2) D8(-2.2,3.3) D9(-2.2,4.4) E1(-1.1,-4.4) E2(-1.1,-3.3) E3(-1.1,-2.2) E4(-1.1,-0.55) E5(-1.1,0.55) E7(-1.1,2.2) E8(-1.1,3.3) E9(-1.1,4.4) F1(0,-4.4) F2(0,-3.3) F3(0,-2.2) F4(0,-0.55) F5(0,0.55) F7(0,2.2) F8(0,3.3) F9(0,4.4) G1(1.1,-4.4) G2(1.1,-3.3) G3(1.1,-2.2) G4(1.1,-0.55) G5(1.1,0.55) G7(1.1,2.2) G8(1.1,3.3) G9(1.1,4.4) H1(2.2,-4.4) H2(2.2,-3.3) H3(2.2,-2.2) H7(2.2,2.2) H8(2.2,3.3) H9(2.2,4.4) J1(3.3,-4.4) J2(3.3,-3.3) J3(3.3,-2.2) J4(3.3,-0.55) J5(3.3,0.55) J7(3.3,2.2) J8(3.3,3.3) J9(3.3,4.4) K1(4.4,-4.4) K2(4.4,-3.3) K3(4.4,-2.2) K5(4.4,0) K7(4.4,2.2) K8(4.4,3.3) K9(4.4,4.4) L1(5.9,-4.4) L9(5.9,4.4) M1(7.4,-4.4) M2(7.4,-3.3) M8(7.4,3.3) M9(7.4,4.4)
Top Overlay:
  circle w0.254: c-5.55,-5.75 r0.1
  lines w0.127: 8.05,-5.35 -6.4,-5.35 -6.4,5.35 8.05,5.35
  lines w0.128: -6.343,-5.194 -6.193,-5.344 ; -6.3,-5.15 cw(c-6.3,-5.3) -6.15,-5.3 ; -6.3,-5.05 cw(c-6.325,-5.349) -6.025,-5.349
Mechanical 11:
  text ".Designator" at -1.075,-0.775 h1.5
Mechanical 13:
  lines w0.05: -6.25,-4.5 -5.5,-5.2 ; -6.25,-5.2 8.05,-5.2 8.05,5.2 -6.25,5.2 -6.25,-5.2
Mechanical 14:
  drawing of 328 lines, arcs and shapes, not listed
Mechanical 15:
  lines w0.05: 0.9,-0.1 1.9,-0.1 ; 1.4,-0.6 1.4,0.4 ; -6.45,-5.4 -6.45,5.4 8.25,5.4 8.25,-5.4 -6.45,-5.4
Mechanical 16:
  drawing of 492 lines, arcs and shapes, not listed
Multi-Layer:
  pour cut-out: 7.1,-4.1 7.1,-3.001 7.9,-2.998 7.9,-5.225 8.25,-5.225 8.25,5.325 7.9,5.325 7.9,3 7.1,3 7.1,4.1 4.7,4.1 4.7,-4.1
3D body "NORA-B100_revA.step": height 1.78, standoff -0.01, extent -6.25,-5.2 8.05,5.2